# Altium footprint library T47x27x15_3PH.PcbLib: 1 footprints
Each footprint in its own frame and in the unit in brackets; x right, y up, seen from the top. Pads: shape width x height; smd on the part's side, far side on the other; paste and mask are expansions set on the pad; w line width, h text height; cw(c..) or ccw(c..) is an arc to the next point about the centre after c.
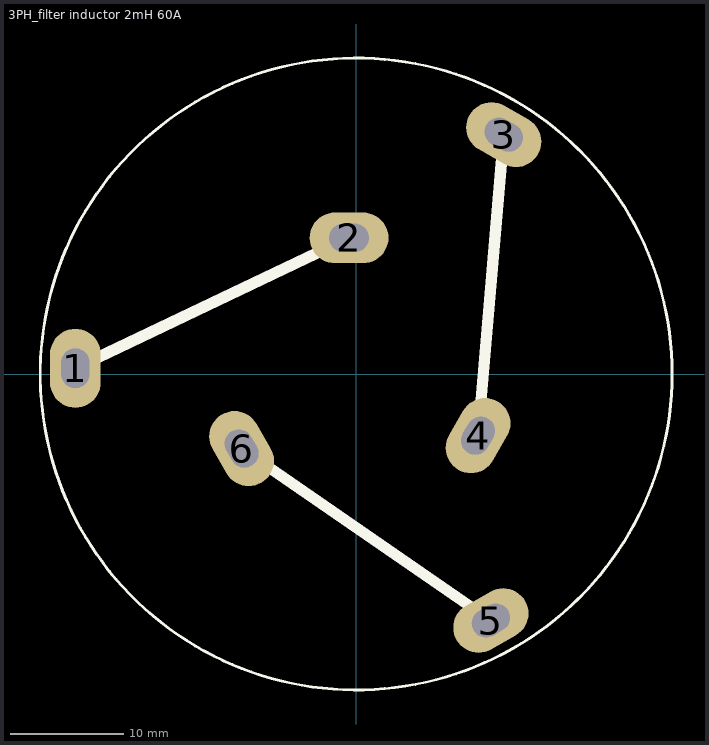
[diagram p0: the footprint, top view; thin cyan lines are the x and y axes]

## 3PH_filter inductor 2mH 60A [mm] "High-current EMI EMC nanocrystalline amorphous three-phase common mode filter inductor 2mH 60A horizontal base plate"
pads (6):
  oval 4.5x7 hole 2.5 slot 3.5 at 90 deg: 1(-24.892,0.508)
  oval 7x4.5 hole 2.5 slot 3.5 at 0 deg: 2(-0.635,12.065)
  oval 7x4.5 hole 2.5 slot 3.5 at 150 deg rot 150: 3(13.081,21.209)
  oval 7x4.5 hole 2.5 slot 3.5 at 60 deg rot 60: 4(10.795,-5.461)
  oval 7x4.5 hole 2.5 slot 3.5 at 30 deg rot 30: 5(11.938,-21.844)
  oval 7x4.5 hole 2.5 slot 3.5 at 120 deg rot 120: 6(-10.16,-6.604)
Top Overlay:
  circle w0.254: c0,0 r28
  lines w1: -24.892,0.508 -0.635,12.065 ; -10.16,-6.604 11.938,-21.844 ; 10.795,-5.461 13.081,21.209
3D body "Синфазный трёхфазный.STEP": height 21.1, standoff -3.6, extent -27,-27 27,27